# Altium integrated library PCB_Project.IntLib: 10 symbols
Pins are listed as number, name and electrical type; pins without a type are passive.

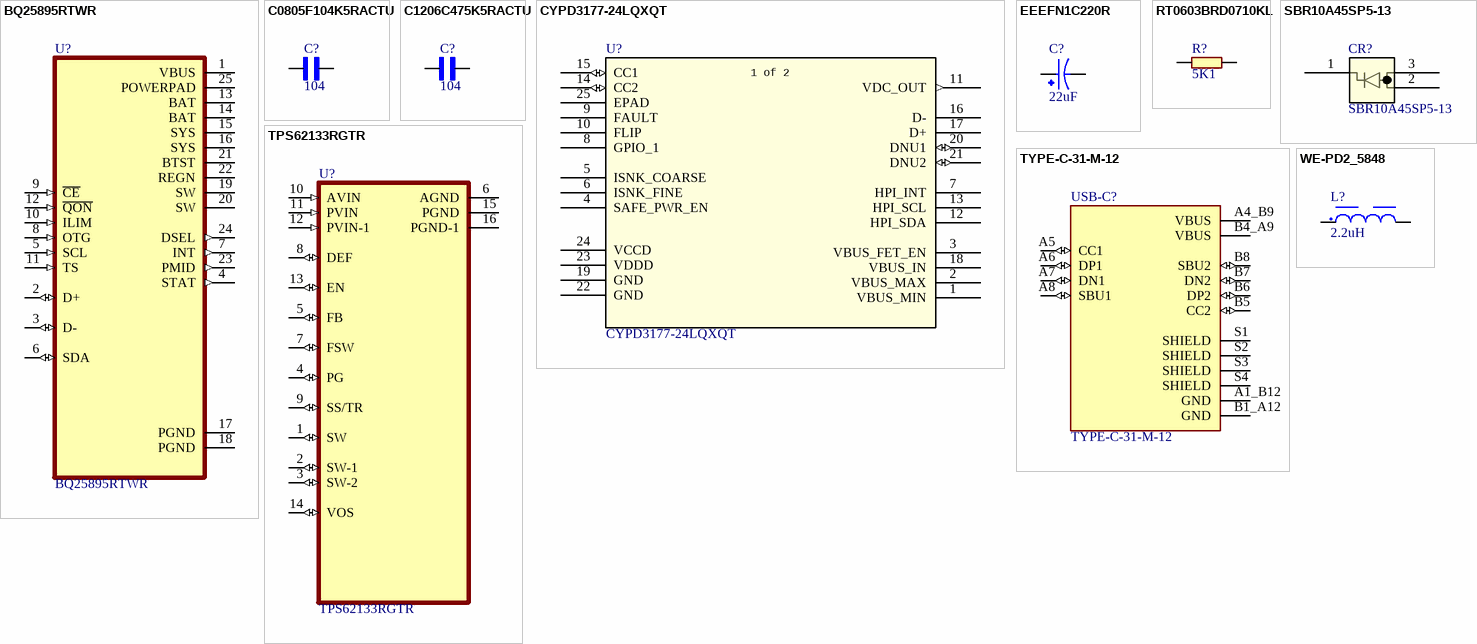
[diagram p0: symbols BQ25895RTWR to WE-PD2_5848]

## BQ25895RTWR
designator U?
I2C 1cell 5A buck battery charger with high input voltage and 3.1-A boost with HVDCP enabled; MF: Texas Instruments; SnapEDA_Link: https://www.snapeda.com/parts/BQ25895RTWR/Texas+Instruments/view-part/?ref=snap; Package: WQFN-24 Texas Instruments; Value: *; MP: BQ25895RTWR; Check_prices: https://www.snapeda.com/parts/BQ25895RTWR/Texas+Instruments/view-part/?ref=eda
footprint QFN50P400X400X80-25N
pins: 1 VBUS (power), 2 D+ (io), 3 D- (io), 4 STAT (out), 5 SCL (in), 6 SDA (io), 7 INT (out), 8 OTG (in), 9 ~{CE} (in), 10 ILIM (in), 11 TS (in), 12 ~{QON} (in), 13 BAT (power), 14 BAT (power), 15 SYS (power), 16 SYS (power), 17 PGND (power), 18 PGND (power), 19 SW (power), 20 SW (power), 21 BTST (power), 22 REGN (power), 23 PMID (out), 24 DSEL (out), 25 POWERPAD (power)

## C0805F104K5RACTU
designator C?, comment 104
0805 C 100nF Ceramic Multilayer Capacitor, 50 VDC, +125degC, X7R Dielec, +/-10% | KEMET C0805F104K5RACTU; SnapEDA_Link: https://www.snapeda.com/parts/C0805F104K5RACTU/KEMET/view-part/?ref=snap; Package: 0805 Kemet; Value: *; MF: KEMET; MP: C0805F104K5RACTU; Check_prices: https://www.snapeda.com/parts/C0805F104K5RACTU/KEMET/view-part/?ref=eda
footprint CAPC2012X88N
pins: 1, 2

## C1206C475K5RACTU
designator C?, comment 104
4.7 ÂµF Â±10% 50V Ceramic Capacitor X7R 1206 (3216 Metric); MF: KEMET; MP: C1206C475K5RACTU; SnapEDA_Link: https://www.snapeda.com/parts/C1206C475K5RACTU/KEMET/view-part/?ref=snap; Package: 1206-2 KEMET; Value: *; Check_prices: https://www.snapeda.com/parts/C1206C475K5RACTU/KEMET/view-part/?ref=eda
footprint CAPC3216X110N
pins: 1, 2

## CYPD3177-24LQXQT
designator U?
EZ-PDâ„¢ Barrel Connector Replacement (BCR) CYPD3177-24LQXQT is the tape and reel packing type option of EZ-PDâ„¢ BCR family, the highly-integrated USB Type-C port controllers for power sink applications. It targets electronic devices using legacy barrel connectors up to 100 W or USB micro-B for power inputs, enabling product designers to replace these incompatible connectors with USB-C.EZ-PDâ„¢ BCR complies with USB Type-C and USB 3.0 Power Delivery (PD) standards and enables users to quickly convert their devices from being powered through a barrel connector to being powered via the USB-C connector with few external components and no firmware development is required. It integrates a complete USB Type-C transceiver, USB PD policy manager, a load switch controller with a soft start, all termination resistors required for a USB Type-C port, and system-level ESD protection. It is available in a 24-pin QFN package.; Manufacturer_Name: Infineon; Copyright: Copyright (C) 2026 Ultra Librarian. All rights reserved.; Manufacturer_Part_Number: CYPD3177-24LQXQT; RefDes: RefDes; Type: Type
footprint QFN24_CYPD3177-24LQXQT_INF
pins: 1 VBUS_MIN, 2 VBUS_MAX, 3 VBUS_FET_EN, 4 SAFE_PWR_EN, 5 ISNK_COARSE, 6 ISNK_FINE, 7 HPI_INT, 8 GPIO_1, 9 FAULT, 10 FLIP, 11 VDC_OUT (out), 12 HPI_SDA, 13 HPI_SCL, 14 CC2 (io), 15 CC1 (io), 16 D-, 17 D+, 18 VBUS_IN, 19 GND (power), 20 DNU1 (io), 21 DNU2 (io), 22 GND (power), 23 VDDD (power), 24 VCCD (power), 25 EPAD
text: 1 of 2

## EEEFN1C220R
designator C?, comment 22uF
CAP ALUM 22UF 20% 16V SMD; MF: Panasonic Electronic Components; MP: EEE-FN1C220R; Package: RADIAL-2 Panasonic; Value: *; Price: None; Check_prices: https://www.snapeda.com/parts/EEE-FN1C220R/Panasonic/view-part/6178704/?ref=eda; Purchase-URL: https://pricing.snapeda.com/search/part/EEE-FN1C220R/?ref=eda; Availability: In Stock; SnapEDA_Link: https://www.snapeda.com/parts/EEE-FN1C220R/Panasonic/view-part/6178704/?ref=snap
footprint CAP_EEEFN1C220R
pins: 1, 2

## RT0603BRD0710KL
designator R?, comment 5K1
10 kOhms Â±0.1% 0.1W, 1/10W Chip Resistor 0603 (1608 Metric) - Thin Film; MF: Yageo; MP: RT0603BRD0710KL; SnapEDA_Link: https://www.snapeda.com/parts/RT0603BRD0710KL/Yageo/view-part/?ref=snap; Package: SMD-2 Yageo; Value: *; Check_prices: https://www.snapeda.com/parts/RT0603BRD0710KL/Yageo/view-part/?ref=eda
footprint 0603
pins: 1, 2

## SBR10A45SP5-13
designator CR?
No Description Available; Manufacturer_Name: Diodes Inc; Copyright: Copyright (C) 2026 Ultra Librarian. All rights reserved.; Manufacturer_Part_Number: SBR10A45SP5-13; RefDes: RefDes; Type: Type
footprint POWERDI5_DIO
pins: 1 CATHODE, 2 ANODE, 3 ANODE

## TPS62133RGTR
designator U?
3-17V 3A Step-Down Converter in 3x3 QFN Package; MF: Texas Instruments; SnapEDA_Link: https://www.snapeda.com/parts/TPS62133RGTR/Texas+Instruments/view-part/?ref=snap; Package: VQFN-16 Texas Instruments; Value: *; MP: TPS62133RGTR; Check_prices: https://www.snapeda.com/parts/TPS62133RGTR/Texas+Instruments/view-part/?ref=eda
footprint QFN50P300X300X100-17N
pins: 1 SW (io), 2 SW-1 (io), 3 SW-2 (io), 4 PG (io), 5 FB (io), 6 AGND (power), 7 FSW (io), 8 DEF (io), 9 SS/TR (io), 10 AVIN (in), 11 PVIN (in), 12 PVIN-1 (in), 13 EN (io), 14 VOS (io), 15 PGND (power), 16 PGND-1 (power)

## TYPE-C-31-M-12
designator USB-C?
USB Connectors 24 Receptacle 1 8.94*7.3mm RoHS; MF: HRO Electronics Co., Ltd.; SnapEDA_Link: https://www.snapeda.com/parts/TYPE-C-31-M-12/HRO+Electronics+Co.%252C+Ltd./view-part/?ref=snap; Package: Package; Value: *; MP: TYPE-C-31-M-12; Check_prices: https://www.snapeda.com/parts/TYPE-C-31-M-12/HRO+Electronics+Co.%252C+Ltd./view-part/?ref=eda
footprint HRO_TYPE-C-31-M-12
pins: A1_B12 GND (power), A4_B9 VBUS (power), A5 CC1 (io), A6 DP1 (io), A7 DN1 (io), A8 SBU1 (io), B1_A12 GND (power), B4_A9 VBUS (power), B5 CC2 (io), B6 DP2 (io), B7 DN2 (io), B8 SBU2 (io), S1 SHIELD, S2 SHIELD, S3 SHIELD, S4 SHIELD

## WE-PD2_5848
designator L?, comment 2.2uH
2.2 ÂµH Unshielded Drum Core, Wirewound Inductor 4.6 A 41mOhm Max Nonstandard; MF: WÃ¼rth Elektronik; MP: 744774022; SnapEDA_Link: https://www.snapeda.com/parts/744774022/W%25C3%25BCrth+Elektronik+Midcom/view-part/?ref=snap; Package: Nonstandard Wurth Electronics; Value: *; Check_prices: https://www.snapeda.com/parts/744774022/W%25C3%25BCrth+Elektronik+Midcom/view-part/?ref=eda
footprint WE-PD2_5848
pins: 1, 2